# EAGLE library part ACS37030LLZATR-040B3 (library ACS37030LLZATR-040B3)
High Accuracy Current Sensor IC Source: Datasheet <https://www.allegromicro.com/~/media/Files/Datasheets/ACS37030-32-Datasheet>
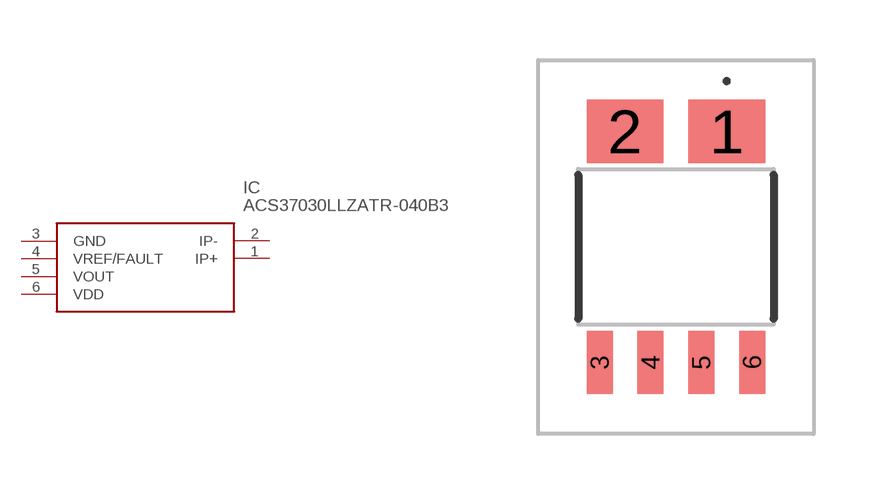
[diagram p0: symbol with the pads of ACS37030LLZATR020B3; footprint ACS37030LLZATR020B3]

Designator prefix IC

## ACS37030LLZATR-040B3 (Arrow_Part_Number: ACS37030LLZATR-040B3; Arrow_Price-Stock: https://www.arrow.com/en/products/acs37030llzatr-040b3/allegro-microsystems?region=nac; Description: High Accuracy Current Sensor IC; Height: 1.82mm; Manufacturer_Name: Allegro Microsystems; Manufacturer_Part_Number: ACS37030LLZATR-040B3; Mouser_Part_Number: 250-ACS37030-040B3; Mouser_Price-Stock: https://www.mouser.co.uk/ProductDetail/Allegro-MicroSystems/ACS37030LLZATR-040B3?qs=mELouGlnn3frD4RmzALMLQ%3D%3D)  [ACS37030LLZATR020B3]
1  IP+
2  IP-
3  GND
4  VREF/FAULT
5  VOUT
6  VDD

## Footprint ACS37030LLZATR020B3 (pad centres in mm)
LZ_1
smd 1.92 x 1.58: 1 1.27,2.89; 2 -1.27,2.89
smd 0.65 x 1.58: 3 -1.905,-2.89; 4 -0.635,-2.89; 5 0.635,-2.89; 6 1.905,-2.89